# Altium footprint library LT8362EMSEPBF.PcbLib: 3 footprints
Each footprint in its own frame and in the unit in brackets; x right, y up, seen from the top. Pads: shape width x height; smd on the part's side, far side on the other; paste and mask are expansions set on the pad; w line width, h text height; cw(c..) or ccw(c..) is an arc to the next point about the centre after c.
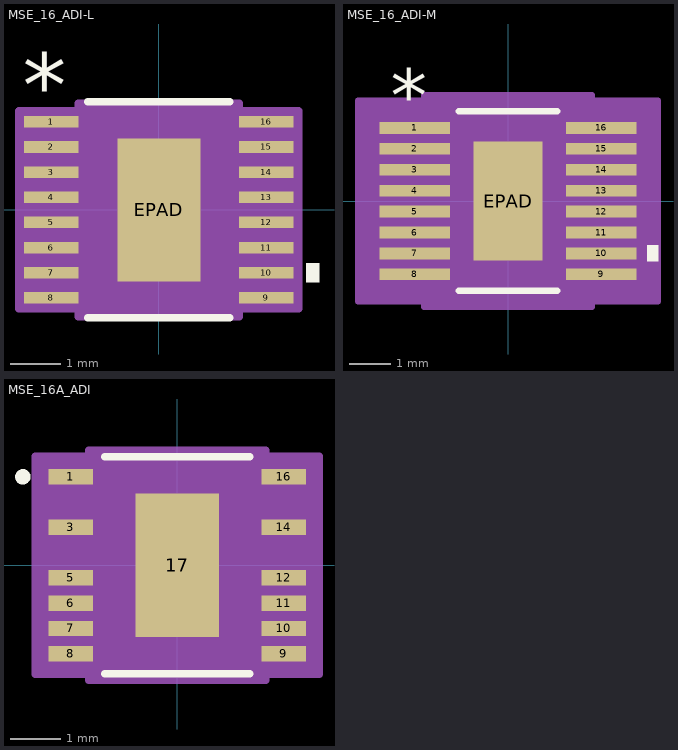
[diagram p0: the footprints below, top view; thin cyan lines are the x and y axes]

## MSE_16_ADI-L [mm]
pads (17):
  rect 1.086x0.229 smd paste+0 mask+0: 1(-2.134,1.75) 2(-2.134,1.25) 3(-2.134,0.75) 4(-2.134,0.25) 5(-2.134,-0.25) 6(-2.134,-0.75) 7(-2.134,-1.25) 8(-2.134,-1.75) 9(2.134,-1.75) 10(2.134,-1.25) 11(2.134,-0.75) 12(2.134,-0.25) 13(2.134,0.25) 14(2.134,0.75) 15(2.134,1.25) 16(2.134,1.75)
  rect 1.651x2.845 smd paste-1.41 mask+0: EPAD(0,0)
Top Overlay:
  region: 2.931,-1.06 3.185,-1.06 3.185,-1.441 2.931,-1.441
  lines w0.152: -1.414,-2.146 1.414,-2.146 ; -1.414,2.146 1.414,2.146
  text "*" at -2.706,1.852 h1.27
  text ".Designator" at -3.492,-0.635 h1.27
Top Paste:
  region: 0.726,-0.1 -0.726,-0.1 -0.726,-1.322 0.726,-1.322
  region: 0.726,1.322 -0.726,1.322 -0.726,0.1 0.726,0.1
Mechanical 13:
  lines w0.025: -0.305,2.019 ccw(c0,2.019) 0.305,2.019 ; -2.527,-1.89 -1.499,-1.89 -1.499,-1.61 -2.527,-1.61 -2.527,-1.89 ; -2.527,-1.39 -1.499,-1.39 -1.499,-1.11 -2.527,-1.11 -2.527,-1.39 ; -2.527,-0.89 -1.499,-0.89 -1.499,-0.61 -2.527,-0.61 -2.527,-0.89 ; -2.527,-0.39 -1.499,-0.39 -1.499,-0.11 -2.527,-0.11 -2.527,-0.39 ; -2.527,0.11 -1.499,0.11 -1.499,0.39 -2.527,0.39 -2.527,0.11 ; -2.527,0.61 -1.499,0.61 -1.499,0.89 -2.527,0.89 -2.527,0.61 ; -2.527,1.11 -1.499,1.11 -1.499,1.39 -2.527,1.39 -2.527,1.11 ; -2.527,1.61 -1.499,1.61 -1.499,1.89 -2.527,1.89 -2.527,1.61 ; -1.499,-2.019 -1.499,2.019 1.499,2.019 1.499,-2.019 -1.499,-2.019 ; 1.499,-1.89 2.527,-1.89 2.527,-1.61 1.499,-1.61 1.499,-1.89 ; 1.499,-1.39 2.527,-1.39 2.527,-1.11 1.499,-1.11 1.499,-1.39 ; 1.499,-0.89 2.527,-0.89 2.527,-0.61 1.499,-0.61 1.499,-0.89 ; 1.499,-0.39 2.527,-0.39 2.527,-0.11 1.499,-0.11 1.499,-0.39 ; 1.499,0.11 2.527,0.11 2.527,0.39 1.499,0.39 1.499,0.11 ; 1.499,0.61 2.527,0.61 2.527,0.89 1.499,0.89 1.499,0.61 ; 1.499,1.11 2.527,1.11 2.527,1.39 1.499,1.39 1.499,1.11 ; 1.499,1.61 2.527,1.61 2.527,1.89 1.499,1.89 1.499,1.61
  text ".Designator" at -3.492,-0.635 h1.27
  text "*" at -1.435,0.673 h1.27
Mechanical 15:
  region: -1.6,-1.966 -2.779,-1.966 -2.779,1.966 -1.6,1.966 -1.6,2.121 1.6,2.121 1.6,1.966 2.779,1.966 2.779,-1.966 1.6,-1.966 1.6,-2.121 -1.6,-2.121
  lines w0.152: -2.779,-1.966 -1.6,-1.966 -1.6,-2.121 1.6,-2.121 1.6,-1.966 2.779,-1.966 2.779,1.966 1.6,1.966 1.6,2.121 -1.6,2.121 -1.6,1.966 -2.779,1.966 -2.779,-1.966
3D body "MSE_16_ADI-L.step": height 1.7, standoff 0, extent -2.527,-2.019 2.527,2.019

## MSE_16_ADI-M [mil]
pads (17):
  rect 66.37x11 smd paste+0 mask+0: 1(-87.97,68.9) 2(-87.97,49.21) 3(-87.97,29.53) 4(-87.97,9.84) 5(-87.97,-9.84) 6(-87.97,-29.53) 7(-87.97,-49.21) 8(-87.97,-68.9) 9(87.97,-68.9) 10(87.97,-49.21) 11(87.97,-29.53) 12(87.97,-9.84) 13(87.97,9.84) 14(87.97,29.53) 15(87.97,49.21) 16(87.97,68.9)
  rect 65x112 smd paste-55.5 mask+0: EPAD(0,0)
Top Overlay:
  region: 131.15,-41.71 141.15,-41.71 141.15,-56.71 131.15,-56.71
  lines w6: -46.44,-84.5 46.44,-84.5 ; -46.44,84.5 46.44,84.5
  text ".Designator" at -137.5,-25 h50
  text "*" at -110.47,74.9 h50
Top Paste:
  region: 28.56,52.06 -28.56,52.06 -28.56,3.94 28.56,3.94
  region: 28.56,-3.94 -28.56,-3.94 -28.56,-52.06 28.56,-52.06
Mechanical 13:
  lines w1: -12,79.5 ccw(c0,79.5) 12,79.5 ; -99.5,-74.4 -99.5,-63.4 -59,-63.4 -59,-74.4 -99.5,-74.4 ; -99.5,-54.71 -99.5,-43.71 -59,-43.71 -59,-54.71 -99.5,-54.71 ; -99.5,-35.03 -99.5,-24.03 -59,-24.03 -59,-35.03 -99.5,-35.03 ; -99.5,-15.34 -99.5,-4.34 -59,-4.34 -59,-15.34 -99.5,-15.34 ; -99.5,4.34 -99.5,15.34 -59,15.34 -59,4.34 -99.5,4.34 ; -99.5,24.03 -99.5,35.03 -59,35.03 -59,24.03 -99.5,24.03 ; -99.5,43.71 -99.5,54.71 -59,54.71 -59,43.71 -99.5,43.71 ; -99.5,63.4 -99.5,74.4 -59,74.4 -59,63.4 -99.5,63.4 ; -59,-79.5 59,-79.5 59,79.5 -59,79.5 -59,-79.5 ; 59,-74.4 59,-63.4 99.5,-63.4 99.5,-74.4 59,-74.4 ; 59,-54.71 59,-43.71 99.5,-43.71 99.5,-54.71 59,-54.71 ; 59,-35.03 59,-24.03 99.5,-24.03 99.5,-35.03 59,-35.03 ; 59,-15.34 59,-4.34 99.5,-4.34 99.5,-15.34 59,-15.34 ; 59,4.34 59,15.34 99.5,15.34 99.5,4.34 59,4.34 ; 59,24.03 59,35.03 99.5,35.03 99.5,24.03 59,24.03 ; 59,43.71 59,54.71 99.5,54.71 99.5,43.71 59,43.71 ; 59,63.4 59,74.4 99.5,74.4 99.5,63.4 59,63.4
  text "*" at -56.5,26.5 h50
  text ".Designator" at -137.5,-25 h50
Mechanical 15:
  region: -79,-94.4 -141.15,-94.4 -141.15,94.4 -79,94.4 -79,99.5 79,99.5 79,94.4 141.15,94.4 141.15,-94.4 79,-94.4 79,-99.5 -79,-99.5
  lines w6: -141.15,-94.4 -141.15,94.4 -79,94.4 -79,99.5 79,99.5 79,94.4 141.15,94.4 141.15,-94.4 79,-94.4 79,-99.5 -79,-99.5 -79,-94.4 -141.15,-94.4
3D body "MSE_16_ADI-M.step": height 67.09, standoff 0, extent -99.49,-79.49 99.49,79.49

## MSE_16A_ADI [mil]
pads (13):
  rect 35x12 smd paste+0 mask+0: 1(-83,68.95) 3(-83,29.55) 5(-83,-9.85) 6(-83,-29.55) 7(-83,-49.25) 8(-83,-68.95) 9(83,-68.95) 10(83,-49.25) 11(83,-29.55) 12(83,-9.85) 14(83,29.55) 16(83,68.95)
  rect 65x112 smd paste-55.5 mask+0: 17(0,0)
Top Overlay:
  circle w6: c-120.35,68.95 r3
  lines w6: -56.53,-84.5 56.53,-84.5 ; -56.53,84.5 56.53,84.5
  text ".Designator" at -137.5,-25 h50
Top Paste:
  region: 28.56,52.06 -28.56,52.06 -28.56,3.94 28.56,3.94
  region: 28.56,-3.94 -28.56,-3.94 -28.56,-52.06 28.56,-52.06
Mechanical 13:
  circle w1: c-49,68.95 r1.5
  lines w1: -12,79.5 ccw(c0,79.5) 12,79.5 ; -59,-79.5 59,-79.5 59,79.5 -59,79.5 -59,-79.5
  text ".Designator" at -137.5,-25 h50
Mechanical 15:
  region: -69,-84.95 -110.5,-84.95 -110.5,84.95 -69,84.95 -69,89.5 69,89.5 69,84.95 110.5,84.95 110.5,-84.95 69,-84.95 69,-89.5 -69,-89.5
  lines w6: -110.5,-84.95 -110.5,84.95 -69,84.95 -69,89.5 69,89.5 69,84.95 110.5,84.95 110.5,-84.95 69,-84.95 69,-89.5 -69,-89.5 -69,-84.95 -110.5,-84.95
3D body "MSE_16A_ADI.step": height 43.11, standoff -2.01, extent -86.73,-79.49 86.73,79.49